# Altium schematic symbol library Capacitors.SchLib: 20 symbols
Pins are listed as number, name and electrical type; pins without a type are passive.

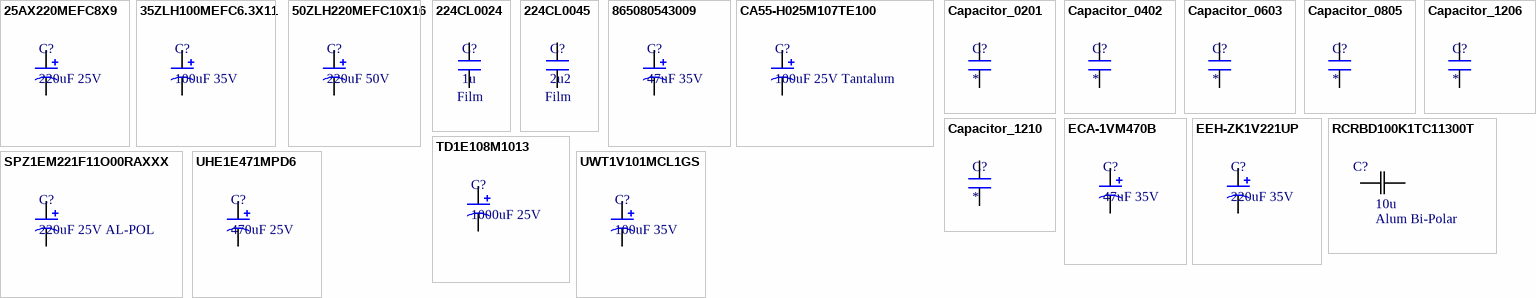
[diagram p0: symbols 25AX220MEFC8X9 to UWT1V101MCL1GS]

## 25AX220MEFC8X9
designator C?, comment 220uF 25V
220uF 25V Aluminum Electrolytic Capacitors Radial, Can 2000 Hrs @ 105°C; Manufacturer Part: 25AX220MEFC8X9; LCSC Part Number: C1589809
footprint CAP_AX_8X9_RUB
pins: +, -

## 35ZLH100MEFC6.3X11
designator C?, comment 100uF 35V
100uF 35V Aluminum Electrolytic Capacitors Radial, Can 6000 Hrs @ 105°C; Manufacturer Part: 35ZLH100MEFC6.3X11; LCSC Part Number: C109392
footprint CAP_AX_8X9_RUB
pins: +, -

## 50ZLH220MEFC10X16
designator C?, comment 220uF 50V
220uF 50V ±20% Plugin,D10xL16mm Aluminum Electrolytic Capacitors - Leaded ROHS; Manufacturer Part: 50ZLH220MEFC10X16; ComponentLink1Description: New link; ComponentLink1URL: VH1C101ME054000CE0; LCSC Part Number: C424109
footprint CAP_YX_10X16_RUB
pins: 1, 2

## 224CL0024
designator C?, comment 1u  Type: Film
CAP FILM 1uF ±5% 63V TH; Manufacturer Part: 224CL0024; Value: 1u; Size: 5mm; LCSC Part Number: C47917087
footprint 224CL0024
pins: 1, 2

## 224CL0045
designator C?, comment 2u2  Type: Film
CAP FILM 2.2uF ±5% 63V TH; Manufacturer Part: 224CL0045; Value: 2u2; Size: 5mm; LCSC Part Number: C47917108
footprint 224CL0045
pins: 1, 2

## 865080543009
designator C?, comment 47uF 35V
47 µF 35 V Aluminum Electrolytic Capacitors Radial, Can - SMD 2000 Hrs @ 105°C; Manufacturer Part: 865080543009
footprint WCAP-ASLI_D6.3H5.5 (Aluminium Electrolytic V-Chip SMT Capacitors, 6.3x5.5mm)
pins: 1, 2

## CA55-H025M107TE100
designator C?, comment 100uF 25V Tantalum
100uF 25V ±20% CASE-H-7343-21(mm) Tantalum Capacitors ROHS; Manufacturer Part: CA55-H025M107TE100; LCSC Part Number: C5280173
footprint CAP_TR3E_VIS
pins: 1, 2

## Capacitor_0201
designator C?
Size: 0201; Manufacturer Part: *; Value: *
footprint Capacitor_0201
pins: 1, 2

## Capacitor_0402
designator C?
Size: 0402; Manufacturer Part: *; Value: *
footprint Capacitor_0402
pins: 1, 2

## Capacitor_0603
designator C?
Size: 0603; Manufacturer Part: *; Value: *
footprint Capacitor_0603
pins: 1, 2

## Capacitor_0805
designator C?
Manufacturer Part: *; Value: *; Size: 0805
footprint Capacitor_0805
pins: 1, 2

## Capacitor_1206
designator C?
Value: *; Size: 1206; Manufacturer Part: *
footprint Capacitor_1206
pins: 1, 2

## Capacitor_1210
designator C?
Value: *; Size: 1210; Manufacturer Part: *
footprint Capacitor_1210
pins: 1, 2

## ECA-1VM470B
designator C?, comment 47uF 35V
47uF 35V Aluminum Electrolytic Capacitors Radial, Can 2000 Hrs @ 85°C; Manufacturer Part: ECA-1VM470B; ComponentLink1Description: New link; ComponentLink1URL: VH1C101ME054000CE0; LCSC Part Number: C1589402
footprint CAPPRD500W50D500H1100
pins: 1, 2

## EEH-ZK1V221UP
designator C?, comment 220uF 35V
220uF 35V Aluminum - Polymer Capacitors Radial, Can - SMD 27mOhm 4000 Hrs @ 125°C; Manufacturer Part: EEH-ZK1V221UP; LCSC Part Number: C454287
footprint CAP_EEHZK1V221UP
pins: 1, 2

## RCRBD100K1TC11300T
designator C?, comment value 10u  Type: Alum Bi-Polar  (hidden comment: 10u 25V Aluminum Bi-Polar)
10 µF 25 V Aluminum Electrolytic Capacitors Radial, Can 2000 Hrs @ 85°C; Manufacturer Part: RCRBD100K1TC11300T; LCSC Part Number: *; Size: *; Digikey Part Number: 604-RCRBD100K1TC11300T-ND
footprint CAP_RCRBD_ELN
pins: 1, 2

## SPZ1EM221F11O00RAXXX
designator C?, comment 220uF 25V AL-POL
25V 220uF Polymer ±20% 20mΩ@100kHz 2.55A@100kHz Through Hole,D8xL11mm Polymer Aluminum Capacitors ROHS; Manufacturer Part: SPZ1EM221F11O00RAXXX; LCSC Part Number: C160181
footprint CAP_PZE_8X9_RUB
pins: 1, 2

## TD1E108M1013
designator C?, comment 1000uF 25V
25V 1000uF ±20% 20mΩ 5A@100kHz Through Hole,D10xL13mm Aluminum - Polymer Capacitors RoHS; Manufacturer Part: TD1E108M1013; LCSC Part Number: C46594045
footprint CAP_MS-10x12_KEM
pins: +, -

## UHE1E471MPD6
designator C?, comment 470uF 25V
470uF 25V Aluminum Electrolytic Capacitors Radial, Can 7000 Hrs @ 105°C; Manufacturer Part: UHE1E471MPD6; LCSC Part Number: C445422
footprint PCAP_10x16-THRU-ELECT_NCA
pins: 1, 2

## UWT1V101MCL1GS
designator C?, comment 100uF 35V
100uF 35V 84mA@120Hz ±20% SMD,D6.3xL7.7mm Aluminum Electrolytic Capacitors - SMD ROHS; Manufacturer Part: UWT1V101MCL1GS; ComponentLink1Description: New link; ComponentLink1URL: VH1C101ME054000CE0; LCSC Part Number: C125975
footprint CAPAE830X1000N
pins: 1, 2